# Altium schematic symbol library 1.5k 0805 resistor.SchLib: 1 symbol
Pins are listed as number, name and electrical type; pins without a type are passive.

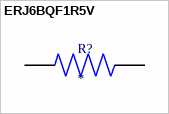
[diagram p0: symbol ERJ6BQF1R5V]

## ERJ6BQF1R5V
designator R?
MP: ERJ6BQF1R5V; Availability: Unavailable; Price: None; Value: *; Package: None
footprint RES_ERJ6BQF1R5V
pins: 1, 2